# Altium footprint library CAP_EEHZU1H151V.PcbLib: 1 footprints
Each footprint in its own frame and in the unit in brackets; x right, y up, seen from the top. Pads: shape width x height; smd on the part's side, far side on the other; paste and mask are expansions set on the pad; w line width, h text height; cw(c..) or ccw(c..) is an arc to the next point about the centre after c.
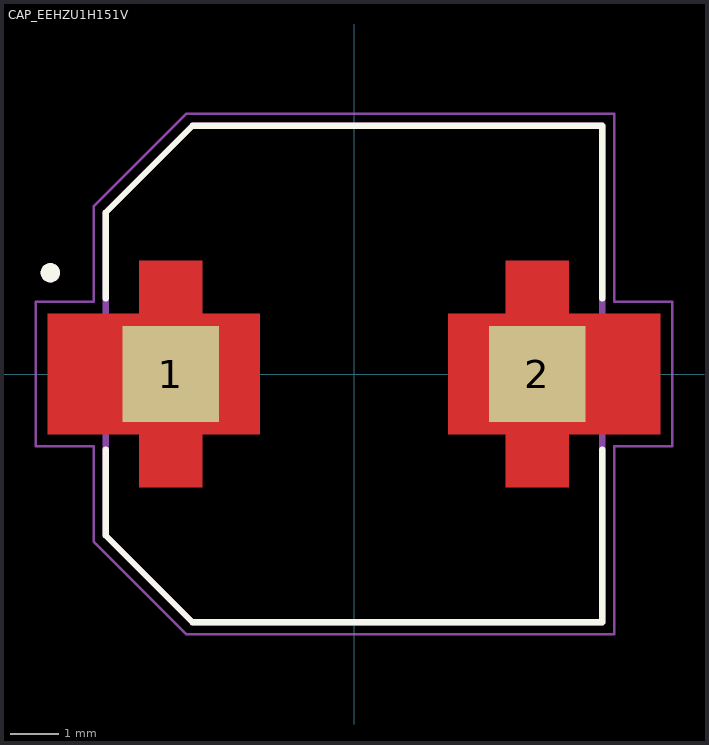
[diagram p0: the footprint, top view; thin cyan lines are the x and y axes]

## CAP_EEHZU1H151V [mm]
pads (2):
  rect 2x2 smd paste-2 mask+0: 1(-3.8,0) 2(3.8,0)
Top Layer:
  region: -3.15,1.25 -1.95,1.25 -1.95,-1.25 -3.15,-1.25 -3.15,-2.35 -4.45,-2.35 -4.45,-1.25 -6.35,-1.25 -6.35,1.25 -4.45,1.25 -4.45,2.35 -3.15,2.35
  region: 4.45,1.25 6.35,1.25 6.35,-1.25 4.45,-1.25 4.45,-2.35 3.15,-2.35 3.15,-1.25 1.95,-1.25 1.95,1.25 3.15,1.25 3.15,2.35 4.45,2.35
Top Overlay:
  circle w0.2: c-6.3,2.1 r0.1
  lines w0.127: -5.15,-1.57 -5.15,-3.35 -3.35,-5.15 5.15,-5.15 5.15,-1.57 ; -5.15,1.57 -5.15,3.35 -3.35,5.15 5.15,5.15 5.15,1.57
Top Paste:
  region: -3.15,1.25 -1.95,1.25 -1.95,-1.25 -3.15,-1.25 -3.15,-2.35 -4.45,-2.35 -4.45,-1.25 -6.35,-1.25 -6.35,1.25 -4.45,1.25 -4.45,2.35 -3.15,2.35
  region: 4.45,1.25 6.35,1.25 6.35,-1.25 4.45,-1.25 4.45,-2.35 3.15,-2.35 3.15,-1.25 1.95,-1.25 1.95,1.25 3.15,1.25 3.15,2.35 4.45,2.35
Top Solder:
  region: -3.05,1.35 -1.85,1.35 -1.85,-1.35 -3.05,-1.35 -3.05,-2.45 -4.55,-2.45 -4.55,-1.35 -6.45,-1.35 -6.45,1.35 -4.55,1.35 -4.55,2.45 -3.05,2.45
  region: 4.55,1.35 6.45,1.35 6.45,-1.35 4.55,-1.35 4.55,-2.45 3.05,-2.45 3.05,-1.35 1.85,-1.35 1.85,1.35 3.05,1.35 3.05,2.45 4.55,2.45
Mechanical 13:
  circle w0.2: c-6.3,2.1 r0.1
  lines w0.127: -5.15,-3.35 -5.15,3.35 -3.35,5.15 5.15,5.15 5.15,-5.15 -3.35,-5.15 -5.15,-3.35
Mechanical 15:
  lines w0.05: -6.6,-1.5 -5.4,-1.5 -5.4,-3.475 -3.475,-5.4 5.4,-5.4 5.4,-1.5 6.6,-1.5 6.6,1.5 5.4,1.5 5.4,5.4 -3.475,5.4 -5.4,3.475 -5.4,1.5 -6.6,1.5 -6.6,-1.5
3D body "step_temp.STEP": height 11.8, standoff -1, extent -5.5,-5.15 5.5,5.15